# Altium schematic symbol library SCH_Lib.SchLib: 59 symbols (part 1 of 2)
Pins are listed as number, name and electrical type; pins without a type are passive.

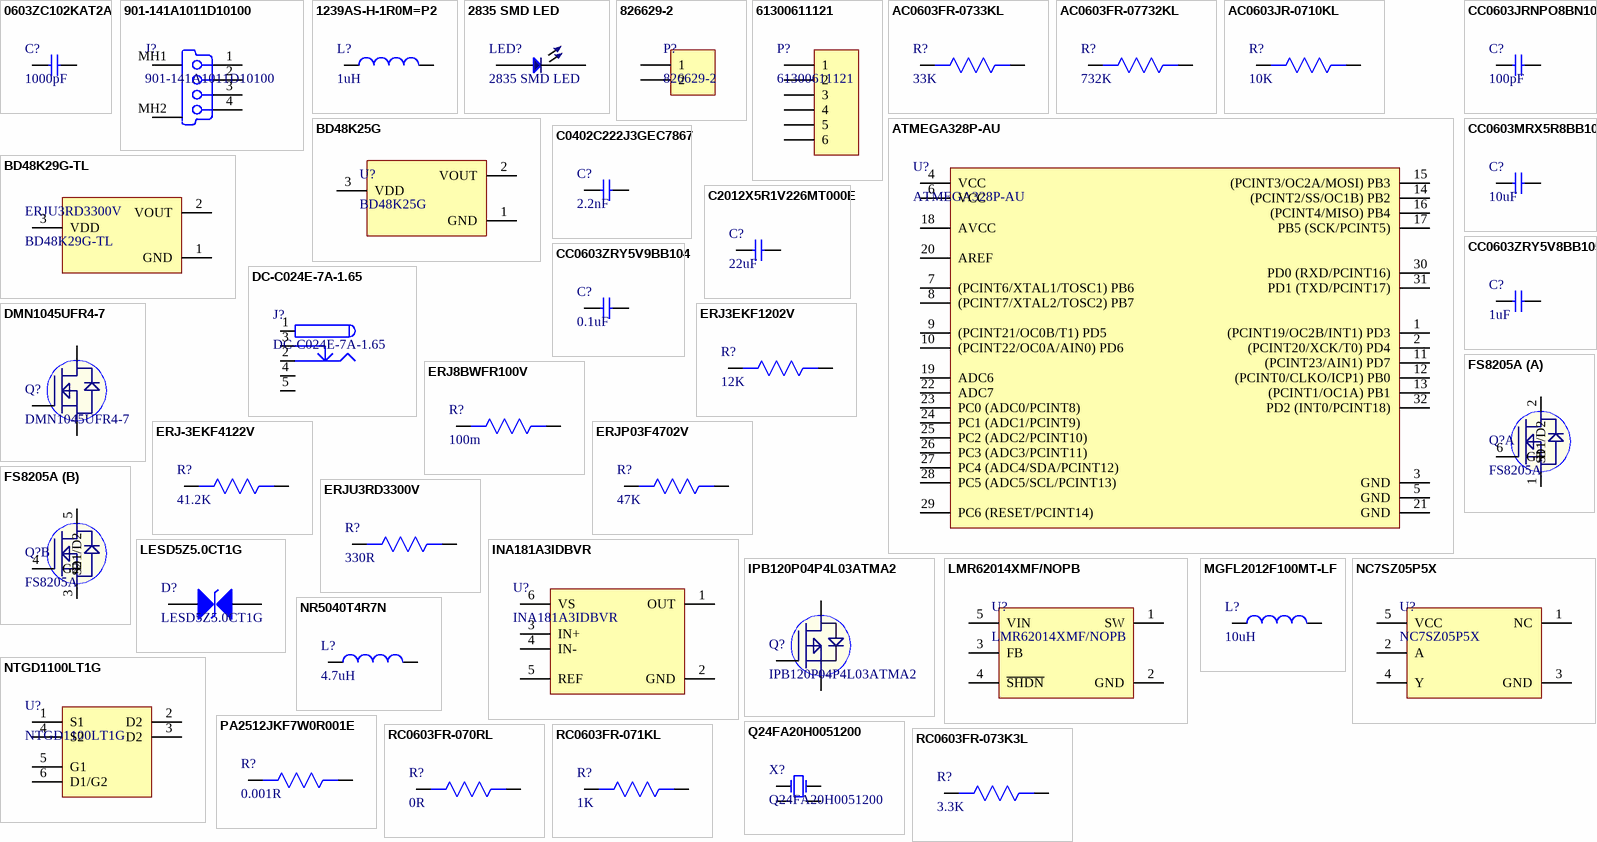
[diagram p0: symbols 0603ZC102KAT2A to RC0603FR-073K3L]

## 0603ZC102KAT2A
designator C?, comment 1000pF
CAP CER 1000PF 10V X7R 0603; Manufacturer: Kyocera AVX; Manufacturer Part Number: 0603ZC102KAT2A; Capacitance: 1nF; Tolerance: 10%; Dissipation Factor: 5%; Supplier 1: Digi-Key; RoHS: Yes; Category: Ceramic Capacitors; Stock 1: 43409; Pricing 1: 1=0.10000, 10=0.05400, 50=0.02960, 100=0.02420, 500=0.01730, 1000=0.01360 (USD); Mount: Surface Mount; Case/Package: 0603; Number of Pins: 2; Case Code (Metric): 1608; Case Code (Imperial): 0603; Min Operating Temperature: -55°C; Max Operating Temperature: 125°C; Dielectric: X7R; Packaging: Tape and Reel; Voltage Rating: 10V; Package Quantity: 4000; Voltage Rating (DC): 10V; Termination: SMD/SMT; Series: -; Construction: Flat; Length: 1.6mm; Width: 0.032inch; Depth: 0.81mm; Thickness: 0.035inch; Radiation Hardening: No; REACH SVHC: Unknown; Lead Free: Lead Free; RoHS Compliant: Yes; ComponentLink1URL: https://datasheet.ciiva.com/204/cx7r-204553.pdf?src-supplier=Digi-Key; ComponentLink1Description: https://datasheet.ciiva.com/204/cx7r-204553.pdf?src-supplier=Digi-Key; ComponentLink2URL: https://datasheet.ciiva.com/5411/cx7r-218113-5411035.pdf?src-supplier=Mouser; ComponentLink2Description: https://datasheet.ciiva.com/5411/cx7r-218113-5411035.pdf?src-supplier=Mouser; Supplier Part Number 1: 478-0603ZC102KAT2ACT-ND
footprint Cap0603
pins: 1, 2

## 901-141A1011D10100
designator J?
USB - Type A 4 USB 2.0 Female THT; Manufacturer: Jing Extension of the Electronic Co.; Current Rating: 1.5A; Number of Ports: 1; Number of Contacts: 4; Mounting Type: ThroughHole，RightAngle; Connector Type: USB - Type A; Standard: USB 2.0; Gender: Female
footprint 901-141A1011D10100 (USB - Type A 4 USB 2.0 Female)
pins: 1 V BUS (5V) "USB Vcc [Red]", 2 D- "USB Data - [White]", 3 D+ "USB Data + [Green]", 4 GND "Not Connected (or joined to pin 5 via resistor)", MH1 Tab "Shell", MH2 Tab "Shell"

## 1239AS-H-1R0M=P2
designator L?, comment 1uH
FIXED IND 1UH 3A 59 MOHM SMD; Manufacturer: Murata; Manufacturer Part Number: 1239AS-H-1R0M=P2; Core Material: Ferrite; Shielding: Shielded; DC Resistance (DCR): 59mR; Test Frequency: 1MHz; Tolerance: 20%; Supplier 1: Digi-Key; RoHS: Yes; Category: Fixed Inductors; Stock 1: 43093; Pricing 1: 1=0.39000, 10=0.34400, 25=0.30120, 50=0.25840, 100=0.23680, 250=0.21524, 500=0.20234, 1000=0.15498 (USD); Mount: Surface Mount; Case/Package: 1008; Case Code (Metric): 2520; Case Code (Imperial): 1008; Min Operating Temperature: -40°C; Max Operating Temperature: 85°C; Packaging: Tape and Reel; Resistor Type: Wirewound; Inductance: 1uH; Current Rating: 3A; Length: 0.098inch; Width: 0.079inch; Height - Seated (Max): 0.047inch; RoHS Compliant: Yes; ComponentLink1URL: http://www.farnell.com/datasheets/2339712.pdf?src-supplier=Farnell; ComponentLink1Description: http://www.farnell.com/datasheets/2339712.pdf?src-supplier=Farnell; ComponentLink2URL: https://www.mouser.com/ds/2/281/product-1023205.pdf?src-supplier=Mouser; ComponentLink2Description: https://www.mouser.com/ds/2/281/product-1023205.pdf?src-supplier=Mouser; ComponentLink3URL: https://www.murata.com/~/media/webrenewal/products/inductor/chip/tokoproducts/wirewoundmetalalloychiptype/m_dfe252012c.ashx?src-supplier=Digi-Key; ComponentLink3Description: https://www.murata.com/~/media/webrenewal/products/inductor/chip/tokoproducts/wirewoundmetalalloychiptype/m_dfe252012c.ashx?src-supplier=Digi-Key; Supplier Part Number 1: 490-10564-1-ND
footprint 1239AS-H-1R0M=P2 (3A 1uH ±20% 59mO 1008 Inductors (SMD) ROHS)
pins: 1, 2

## 2835 SMD LED
designator LED?
SMD LED 2835 Chips 1W 3V SMD; Manufacturer: ENLINCA; Max. Forward voltage: 3V; Package: 2835
footprint 2835 LED (1W LED SMD)
pins: 1, 2

## 826629-2
designator P?
CONN HEADER VERT 2POS 2.54MM; Manufacturer: TE Connectivity; Manufacturer Part Number: 8266292; Number of Contacts: 2; Connector Type: Plug,Header,Pin; Current Rating: 3A; Board Standoff: No (Without); High Speed Serial Data Connector: No; PCB Mount Retention: Without; Gender: Male; PCB Mounting Orientation: Vertical; Contact Post Length: 0.1259inch; Plating Thickness: 0.8um; Supplier 1: RSComponents; RoHS: Yes; Category: Board to Board Connectors; Mount: Straddle Mount; Contact Plating: Gold,Tin; Contact Material: Bronze; Color: Green; Housing Color: Green; Housing Material: PBT; Contact Shape: Square; Min Operating Temperature: -65°C; Max Operating Temperature: 105°C; Number of Rows: 1; Termination: Through Hole; Number of Positions: 2; Packaging: Carton; Package Quantity: 3000; Series: AMPMODU MOD II; Contact Type: Male Pin; Contact Gender: Male; Orientation: Straight; Contact Protection: No (Without); Gasket: No (Without); High Temperature Housing: No; Keyed: No; Mating Alignment: No (Without); Mating Connector Lock: No (Without); Selectively Loaded: No (Without); Stabilizers: No (Without); Strain Relief: No (Without); Length: 5.08mm; Pitch: 2.54mm; Contact Mating Length: 6.7mm; Row Spacing: 2.54mm; Depth: 2.5mm; Radiation Hardening: No; Flammability Rating: UL94 V-0; REACH SVHC: No SVHC; ELV: Compliant; Lead Free: Lead Free; ComponentLink1URL: https://datasheet.ciiva.com/11746/0900766b80d7c358-11746248.pdf?src-supplier=RSComponents; ComponentLink1Description: https://datasheet.ciiva.com/11746/0900766b80d7c358-11746248.pdf?src-supplier=RSComponents; ComponentLink2URL: https://datasheet.ciiva.com/30224/8266292-30224019.pdf?src-supplier=Onlinecomponents.com; ComponentLink2Description: https://datasheet.ciiva.com/30224/8266292-30224019.pdf?src-supplier=Onlinecomponents.com; ComponentLink3URL: https://datasheet.ciiva.com/29369/001094754-da-01-en-stiftleiste-1-reihig-0-0826629-2-29369600.pdf?src-supplier=Conrad; ComponentLink3Description: https://datasheet.ciiva.com/29369/001094754-da-01-en-stiftleiste-1-reihig-0-0826629-2-29369600.pdf?src-supplier=Conrad; ComponentLink4URL: https://datasheet.ciiva.com/6857/eng-cd-826629-aa-basefilename-6857135.pdf?src-supplier=Digi-Key; ComponentLink4Description: https://datasheet.ciiva.com/6857/eng-cd-826629-aa-basefilename-6857135.pdf?src-supplier=Digi-Key; ComponentLink5URL: https://datasheet.ciiva.com/14120/eh826629-draw-14120837.pdf?src-supplier=Distrelec; ComponentLink5Description: https://datasheet.ciiva.com/14120/eh826629-draw-14120837.pdf?src-supplier=Distrelec; Supplier Part Number 1: 1361864
footprint HDR1X2 (CONN HEADER VERT 2POS 2.54MM)
pins: 1, 2

## 61300611121
designator P?
CONN HEADER VERT 6POS 2.54MM; Manufacturer: Wurth Electronics; Current Rating: 3A; Voltage Rating: 250V; Number of Positions: 6; Gender: Male; Connector Type: Male Pin; Pitch: 0.1inch; Supplier 1: Digi-Key; Manufacturer Part Number: 61300611121; Stock 1: 14573; Pricing 1: 1=0.33, 10=0.279, 25=0.232, 50=0.194, 100=0.176, 1000=0.16 (USD); Mount: Through Hole; Contact Plating: Gold; Contact Material: Copper Alloy,Copper; Housing Material: PBT; Color: Black; Min Operating Temperature: -40°C; Max Operating Temperature: 125°C; Number of Rows: 1; Contact Gender: Male; Packaging: Bulk; Termination: Through Hole; Number of Contacts: 6; Contact Mating Length: 0.236inch; REACH SVHC: Unknown; Lead Free: Lead Free; ComponentLink1URL: http://www.farnell.com/cad/1737268.pdf?src-supplier=Element14; ComponentLink1Description: http://www.farnell.com/cad/1737268.pdf?src-supplier=Element14; ComponentLink2URL: https://katalog.we-online.de/em/datasheet/6130xx11121.pdf?src-supplier=Digi-Key; ComponentLink2Description: https://katalog.we-online.de/em/datasheet/6130xx11121.pdf?src-supplier=Digi-Key; ComponentLink3URL: http://www.mouser.com/ds/2/445/6130xx11121-538006.pdf?src-supplier=Mouser; ComponentLink3Description: http://www.mouser.com/ds/2/445/6130xx11121-538006.pdf?src-supplier=Mouser; Supplier Part Number 1: 732-5319-ND
footprint HDR1X6 (Connector; Header; 6 Position)
pins: 1, 2, 3, 4, 5, 6

## AC0603FR-0733KL
designator R?, comment 33K
RES SMD 33K OHM 1% 1/10W 0603; Manufacturer: Yageo; Manufacturer Part Number: AC0603FR-0733KL; Resistance: 33kR; Power Rating: 100mW; Voltage Rating: 50V; Temperature Coefficient: 100ppm/°C; Supplier 1: Digi-Key; RoHS: Yes; Category: Chip SMD Resistors; Stock 1: 9255; Pricing 1: 1=0.10000, 10=0.02900, 100=0.01170, 1000=0.00527, 2500=0.00458 (USD); Case/Package: 0603; Case Code (Imperial): 0603; Case Code (Metric): 1608; Min Operating Temperature: -55°C; Max Operating Temperature: 155°C; Tolerance: 1%; Packaging: Tape and Reel; Resistor Type: Thick Film; Number of Terminations: 2; Termination: SMD/SMT; Max Power Dissipation: 100mW; Features: Moisture Resistant,Automotive AEC-Q200; Series: AC; Construction: Rectangular; Length: 1.6mm; Width: 0.031inch; Height: 0.022inch; Depth: 0.8mm; Military Standard: Not; Lead Free: Lead Free; RoHS Compliant: Yes; ComponentLink1URL: http://components.arrow.com/part/dataview/0323_03349868?src-supplier=Arrow+Europe; ComponentLink1Description: http://components.arrow.com/part/dataview/0323_03349868?src-supplier=Arrow+Europe; ComponentLink2URL: http://www.yageo.com/NewPortal/yageodocoutput?fileName=/pdf/R-Chip/PYu-AC_51_RoHS_L_6.pdf&src-supplier=Arrow+Electronics; ComponentLink2Description: http://www.yageo.com/NewPortal/yageodocoutput?fileName=/pdf/R-Chip/PYu-AC_51_RoHS_L_6.pdf&src-supplier=Arrow+Electronics; ComponentLink3URL: http://www.yageo.com/NewPortal/yageodocoutput?fileName=/pdf/R-Chip/PYu-AC_51_RoHS_L_6.pdf&src-supplier=Digi-Key; ComponentLink3Description: http://www.yageo.com/NewPortal/yageodocoutput?fileName=/pdf/R-Chip/PYu-AC_51_RoHS_L_6.pdf&src-supplier=Digi-Key; ComponentLink4URL: http://www.yageo.com/documents/recent/PYu-AC_51_RoHS_L_2.pdf?src-supplier=Future+Electronics; ComponentLink4Description: http://www.yageo.com/documents/recent/PYu-AC_51_RoHS_L_2.pdf?src-supplier=Future+Electronics; ComponentLink5URL: http://www.yageo.com/NewPortal/yageodocoutput?fileName=/pdf/R-Chip/PYu-AC_51_RoHS_L_6.pdf&src-supplier=Mouser; ComponentLink5Description: http://www.yageo.com/NewPortal/yageodocoutput?fileName=/pdf/R-Chip/PYu-AC_51_RoHS_L_6.pdf&src-supplier=Mouser; ComponentLink6URL: http://www.yageo.com/NewPortal/yageodocoutput?fileName=/pdf/R-Chip/PYu-AC_51_RoHS_L_6.pdf&src-supplier=Rutronik; ComponentLink6Description: http://www.yageo.com/NewPortal/yageodocoutput?fileName=/pdf/R-Chip/PYu-AC_51_RoHS_L_6.pdf&src-supplier=Rutronik; ComponentLink7URL: http://www.yageo.com/NewPortal/yageodocoutput?fileName=/pdf/R-Chip/PYu-AC_51_RoHS_L_6.pdf&src-supplier=Schukat; ComponentLink7Description: http://www.yageo.com/NewPortal/yageodocoutput?fileName=/pdf/R-Chip/PYu-AC_51_RoHS_L_6.pdf&src-supplier=Schukat; ComponentLink8URL: http://www.yageo.com/NewPortal/yageodocoutput?fileName=/pdf/R-Chip/PYu-AC_51_RoHS_L_6.pdf&src-supplier=TTI; ComponentLink8Description: http://www.yageo.com/NewPortal/yageodocoutput?fileName=/pdf/R-Chip/PYu-AC_51_RoHS_L_6.pdf&src-supplier=TTI; Supplier Part Number 1: YAG3598CT-ND
footprint Res0603
pins: 1, 2

## AC0603FR-07732KL
designator R?, comment 732K
RES SMD 732kOhm 1% 0603; Manufacturer: Yageo; Manufacturer Part Number: AC0603FR-07732KL; Power Rating: 100mW; Resistance: 732kR; Voltage Rating: 50V; Temperature Coefficient: 100ppm/°C; Supplier 1: Mouser; RoHS: Yes; Category: Chip SMD Resistors; Stock 1: 40000; Pricing 1: 1=0.10000, 10=0.02200, 50=0.02200, 100=0.00800, 1000=0.00600, 10000=0.00400 (USD); Case/Package: 0603; Case Code (Imperial): 0603; Case Code (Metric): 1608; Min Operating Temperature: -55°C; Max Operating Temperature: 155°C; Packaging: Tape and Reel; Tolerance: 1%; Resistor Type: Thick Film; Number of Terminations: 2; Termination: SMD/SMT; Max Power Dissipation: 100mW; Features: Moisture Resistant,Automotive AEC-Q200; Series: AC; Length: 0.063inch; Width: 0.031inch; Height: 0.022inch; RoHS Compliant: Yes; ComponentLink1URL: http://www.mouser.com/ds/2/447/yageodocoutput-1111992.pdf?src-supplier=Mouser; ComponentLink1Description: http://www.mouser.com/ds/2/447/yageodocoutput-1111992.pdf?src-supplier=Mouser; ComponentLink2URL: http://www.yageo.com/NewPortal/yageodocoutput?fileName=/pdf/R-Chip/PYu-AC_51_RoHS_L_6.pdf&src-supplier=Digi-Key; ComponentLink2Description: http://www.yageo.com/NewPortal/yageodocoutput?fileName=/pdf/R-Chip/PYu-AC_51_RoHS_L_6.pdf&src-supplier=Digi-Key; Supplier Part Number 1: 603-AC0603FR-07732KL
footprint Res0603
pins: 1, 2

## AC0603JR-0710KL
designator R?, comment 10K
RES SMD 10K OHM 5% 1/10W 0603; Manufacturer: Yageo; Manufacturer Part Number: AC0603JR-0710KL; Voltage Rating: 50V; Resistance: 10kR; Power Rating: 100mW; Temperature Coefficient: 100ppm/°C; Supplier 1: Future Electronics; RoHS: Yes; Category: Chip SMD Resistors; Stock 1: 1533000; Pricing 1: 5000=0.00540 (USD); Case/Package: 0603; Case Code (Imperial): 0603; Case Code (Metric): 1608; Size Code: 0603; Min Operating Temperature: -55°C; Max Operating Temperature: 155°C; Packaging: Tape and Reel; Tolerance: 5%; Package Quantity: 1; Resistor Type: Thick Film; Termination: SMD/SMT; Number of Terminations: 2; Max Power Dissipation: 100mW; Features: Moisture Resistant,Automotive AEC-Q200,Anti-Sulfur; Series: AC; Construction: Rectangular; Length: 0.063inch; Width: 0.031inch; Height: 0.022inch; Depth: 0.8mm; Military Standard: Not; Lead Free: Lead Free; RoHS Compliant: Yes; ComponentLink1URL: https://datasheet.ciiva.com/5562/pyu-ac-51-rohs-l-2-5562553.pdf?src-supplier=Mouser; ComponentLink1Description: https://datasheet.ciiva.com/5562/pyu-ac-51-rohs-l-2-5562553.pdf?src-supplier=Mouser; Supplier Part Number 1: 1029044
footprint Res0603
pins: 1, 2

## ATMEGA328P-AU
designator U?
IC MCU 8BIT 32KB FLASH 32TQFP; Manufacturer: Microchip / Atmel; Frequency: 20MHz; Interface: I2C,SPI,USART; Number of I/Os: 23; Oscillator Type: Internal; Peripherals: Brown-out Detect/Reset,POR,PWM,WDT; Core Architecture: AVR; RAM Size: 2KB; Max Supply Voltage: 5.5V; Min Supply Voltage: 1.8V; Number of Timers/Counters: 3; Data Bus Width: 8b; Watchdog Timer: Yes; Number of ADC Channels: 8; Number of PWM Channels: 6; Number of SPI Channels: 1; Supplier 1: Newark; Manufacturer Part Number: ATMEGA328P-AU; RoHS: Yes; Category: Microcontrollers; Mount: Surface Mount; Case/Package: A; Number of Pins: 32; Weight: 0.002469oz; Min Operating Temperature: -40°C; Max Operating Temperature: 85°C; Packaging: Tray; Memory Type: FLASH; Memory Size: 32KB; Package Quantity: 250; Number of Programmable I/O: 23; Max Frequency: 20MHz; Series: ATmega328P; Number of I2C Channels: 1; Length: 7mm; Width: 7mm; Height: 1mm; Radiation Hardening: No; RoHS Compliant: Yes; REACH SVHC: No SVHC; Lead Free: Lead Free; ComponentLink1URL: https://datasheet.ciiva.com/1166/doc8161-1166860.pdf?src-supplier=Newark; ComponentLink1Description: https://datasheet.ciiva.com/1166/doc8161-1166860.pdf?src-supplier=Newark; ComponentLink2URL: https://datasheet.ciiva.com/29119/155196-da-01-en-microcontr-atmega328p-au-8bit-tqfp-32-29119594.pdf?src-supplier=Conrad; ComponentLink2Description: https://datasheet.ciiva.com/29119/155196-da-01-en-microcontr-atmega328p-au-8bit-tqfp-32-29119594.pdf?src-supplier=Conrad; ComponentLink3URL: https://datasheet.ciiva.com/1157/1693866-1157693.pdf?src-supplier=Element14; ComponentLink3Description: https://datasheet.ciiva.com/1157/1693866-1157693.pdf?src-supplier=Element14; ComponentLink4URL: https://datasheet.ciiva.com/15213/getdatasheetpartid-365828-15213131.pdf?src-supplier=Verical; ComponentLink4Description: https://datasheet.ciiva.com/15213/getdatasheetpartid-365828-15213131.pdf?src-supplier=Verical; Supplier Part Number 1: 25AC6140
footprint 32 TQFP (7X7) (IC MCU 8BIT 32KB FLASH 32TQFP)
pins: 1 (PCINT19/OC2B/INT1) PD3, 2 (PCINT20/XCK/T0) PD4, 3 GND, 4 VCC, 5 GND, 6 VCC, 7 (PCINT6/XTAL1/TOSC1) PB6, 8 (PCINT7/XTAL2/TOSC2) PB7, 9 (PCINT21/OC0B/T1) PD5, 10 (PCINT22/OC0A/AIN0) PD6, 11 (PCINT23/AIN1) PD7, 12 (PCINT0/CLKO/ICP1) PB0, 13 (PCINT1/OC1A) PB1, 14 (PCINT2/SS/OC1B) PB2, 15 (PCINT3/OC2A/MOSI) PB3, 16 (PCINT4/MISO) PB4, 17 PB5 (SCK/PCINT5), 18 AVCC, 19 ADC6, 20 AREF, 21 GND, 22 ADC7, 23 PC0 (ADC0/PCINT8), 24 PC1 (ADC1/PCINT9), 25 PC2 (ADC2/PCINT10), 26 PC3 (ADC3/PCINT11), 27 PC4 (ADC4/SDA/PCINT12), 28 PC5 (ADC5/SCL/PCINT13), 29 PC6 (RESET/PCINT14), 30 PD0 (RXD/PCINT16), 31 PD1 (TXD/PCINT17), 32 PD2 (INT0/PCINT18)

## BD48K25G
designator U?
IC SUPERVISOR 1 CHANNEL 3SSOP; Manufacturer: Rohm; Manufacturer Part Number: BD48K25G-TL; Max Supply Voltage: 6V; Min Supply Voltage: 2.3V; Number of Voltages Monitored: 1; Reset: Active Low; Threshold Voltage: 2.5V; Accuracy: 1%; Operating Supply Current: 900nA; ComponentLink1URL: https://datasheet.ciiva.com/3231/lmr62014-3231410.pdf?src-supplier=Avnet; ComponentLink1Description: https://datasheet.ciiva.com/3231/lmr62014-3231410.pdf?src-supplier=Avnet; ComponentLink2URL: https://datasheet.ciiva.com/23854/1777788-23854326.pdf?src-supplier=Newark; ComponentLink2Description: https://datasheet.ciiva.com/23854/1777788-23854326.pdf?src-supplier=Newark; ComponentLink3URL: https://datasheet.ciiva.com/4879/snvs735a-74121-4879731.pdf?src-supplier=Mouser; ComponentLink3Description: https://datasheet.ciiva.com/4879/snvs735a-74121-4879731.pdf?src-supplier=Mouser; ComponentLink4URL: https://datasheet.ciiva.com/22669/1716576-22669414.pdf?src-supplier=Element14; ComponentLink4Description: https://datasheet.ciiva.com/22669/1716576-22669414.pdf?src-supplier=Element14; ComponentLink5URL: https://datasheet.ciiva.com/6603/lmr62014-6603804.pdf?src-supplier=Digi-Key; ComponentLink5Description: https://datasheet.ciiva.com/6603/lmr62014-6603804.pdf?src-supplier=Digi-Key; ComponentLink6URL: https://datasheet.ciiva.com/6603/lmr62014-6603807.pdf?src-supplier=Digi-Key; ComponentLink6Description: https://datasheet.ciiva.com/6603/lmr62014-6603807.pdf?src-supplier=Digi-Key; Supplier 1: Digi-Key; Stock 1: 1860; Pricing 1: 1=0.48, 10=0.39, 25=0.3568, 100=0.2656, 250=0.2407, 500=0.1992, 1000=0.1494 (USD); Mount: Surface Mount; Case/Package: TO-236-3; Number of Pins: 3; Min Operating Temperature: -40°C; Max Operating Temperature: 105°C; Packaging: Tape and Reel; Package Quantity: 3000; Number of Monitored Inputs: 1; Type: Simple Reset/Power-On Reset; Series: BD48xxx; Lead Free: Lead Free; ComponentLink7URL: https://www.verical.com/server-webapp/html/getDatasheet?partID=705722&src-supplier=Verical; ComponentLink7Description: https://www.verical.com/server-webapp/html/getDatasheet?partID=705722&src-supplier=Verical; ComponentLink8URL: http://rohmfs.rohm.com/en/techdata_basic/ic/package/ssop3_1-e.pdf?src-supplier=Digi-Key; ComponentLink8Description: http://rohmfs.rohm.com/en/techdata_basic/ic/package/ssop3_1-e.pdf?src-supplier=Digi-Key; ComponentLink9URL: http://rohmfs.rohm.com/en/products/databook/datasheet/ic/power/voltage_detector/bd48xxg-e.pdf?src-supplier=Digi-Key; ComponentLink9Description: http://rohmfs.rohm.com/en/products/databook/datasheet/ic/power/voltage_detector/bd48xxg-e.pdf?src-supplier=Digi-Key; Supplier Part Number 1: BD48K25G-TLDKR-ND
footprint 3-SSOP
pins: 1 GND, 2 VOUT, 3 VDD

## BD48K29G-TL
designator ERJU3RD3300V
IC DETECTOR VOLT 2.9V OD SSOP3; Manufacturer: Rohm; Max Supply Voltage: 6V; Min Supply Voltage: 2.3V; Number of Voltages Monitored: 1; Reset: Active Low; Accuracy: 1%; Operating Supply Current: 900nA; Max Reset Threshold Voltage: 2.929V; Min Reset Threshold Voltage: 2.871V; Supplier 1: Mouser; Manufacturer Part Number: BD48K29G-TL; RoHS: Yes; Category: Voltage Supervisors; Stock 1: 2854; Pricing 1: 1=0.48000, 10=0.39100, 50=0.39100, 100=0.24100, 500=0.20000, 1000=0.15000, 3000=0.13600, 10000=0.13600 (USD); Mount: Surface Mount; Case/Package: SSOP; Number of Pins: 3; Min Operating Temperature: -40°C; Max Operating Temperature: 105°C; Packaging: Tape and Reel; Package Quantity: 1; Threshold Voltage: 2.9V; Number of Monitored Inputs: 1; Type: Simple Reset/Power-On Reset,Voltage Detector; Series: BD48xxx; Radiation Hardening: No; Lead Free: Lead Free; RoHS Compliant: Yes; ComponentLink1URL: https://datasheet.ciiva.com/15105/getdatasheetpartid-705726-15105774.pdf?src-supplier=Verical; ComponentLink1Description: https://datasheet.ciiva.com/15105/getdatasheetpartid-705726-15105774.pdf?src-supplier=Verical; ComponentLink2URL: https://datasheet.ciiva.com/6598/bd48xxg-e-6598662.pdf?src-supplier=Digi-Key; ComponentLink2Description: https://datasheet.ciiva.com/6598/bd48xxg-e-6598662.pdf?src-supplier=Digi-Key; Supplier Part Number 1: 755-BD48K29G-TL
footprint 3-SSOP
pins: 1 GND, 2 VOUT, 3 VDD

## C0402C222J3GEC7867
designator C?, comment 2.2nF
CAP CER 0402 2.2NF 25V C0G 5%; Manufacturer: KEMET; Manufacturer Part Number: C0402C222J3GEC7867; ComponentLink1URL: http://www.yageo.com/documents/recent/UPY-GPHC_Y5V_6.3V-to-50V_8.pdf?src-supplier=Digi-Key; ComponentLink1Description: http://www.yageo.com/documents/recent/UPY-GPHC_Y5V_6.3V-to-50V_8.pdf?src-supplier=Digi-Key; ComponentLink2URL: http://www.yageo.com/documents/recent/UPY-GPHC_Y5V_6.3V-to-50V_5.pdf?src-supplier=Avnet+Europe; ComponentLink2Description: http://www.yageo.com/documents/recent/UPY-GPHC_Y5V_6.3V-to-50V_5.pdf?src-supplier=Avnet+Europe; ComponentLink3URL: https://www.verical.com/server-webapp/html/getDatasheet?partID=403611&src-supplier=Verical; ComponentLink3Description: https://www.verical.com/server-webapp/html/getDatasheet?partID=403611&src-supplier=Verical; ComponentLink4URL: http://www.mouser.com/ds/2/447/Yageo_UPY-GP_NP0_16V-to-50V_9-358835.pdf?src-supplier=Mouser; ComponentLink4Description: http://www.mouser.com/ds/2/447/Yageo_UPY-GP_NP0_16V-to-50V_9-358835.pdf?src-supplier=Mouser; ComponentLink5URL: http://www.farnell.com/datasheets/1132289.pdf?src-supplier=Element14; ComponentLink5Description: http://www.farnell.com/datasheets/1132289.pdf?src-supplier=Element14; ComponentLink6URL: http://www.yageo.com/documents/recent/UPY-GP_NP0_16V-to-50V_8.pdf?src-supplier=Avnet; ComponentLink6Description: http://www.yageo.com/documents/recent/UPY-GP_NP0_16V-to-50V_8.pdf?src-supplier=Avnet; ComponentLink7URL: http://www.yageo.com/documents/recent/UPY-GP_NP0_16V-to-50V_8.pdf?src-supplier=Avnet+Europe; ComponentLink7Description: http://www.yageo.com/documents/recent/UPY-GP_NP0_16V-to-50V_8.pdf?src-supplier=Avnet+Europe; Supplier 1: Digi-Key; Stock 1: 5024; Pricing 1: 1=0.17, 10=0.123, 50=0.07, 100=0.058, 500=0.0407, 1000=0.0337, 2500=0.0314, 5000=0.0287 (USD); ComponentLink8URL: https://api.kemet.com/component-edge/download/datasheet/C0402C222J3GEC7867.pdf?src-supplier=Digi-Key; ComponentLink8Description: https://api.kemet.com/component-edge/download/datasheet/C0402C222J3GEC7867.pdf?src-supplier=Digi-Key; Supplier Part Number 1: 399-C0402C222J3GEC7867CT-ND
footprint Cap 0402
pins: 1, 2

## C2012X5R1V226MT000E
designator C?, comment 22uF
CAP CER 22UF 35V X5R 0805; Manufacturer: TDK Corporation; Manufacturer Part No: C2012X5R1V226M125AC; Package: 0805; ComponentLink1Description: Digikey; ComponentLink1URL: https://www.digikey.com/en/products/detail/tdk-corporation/C2012X5R1V226M125AC/3951664?s=N4IgTCBcDaIMJgAwEYwA0CsAlZA1MYAbALIAqiFAoiALoC%2BQA
footprint Cap0805 (SMD 0805)
pins: 1, 2

## CC0603JRNPO8BN101
designator C?, comment 100pF
CAP CER 100PF 25V C0G/NPO 0603; Manufacturer: Yageo; Manufacturer Part Number: CC0603JRNPO8BN101; Tolerance: 5%; Dielectric: C0G; ComponentLink1URL: http://www.yageo.com/documents/recent/UPY-GPHC_Y5V_6.3V-to-50V_8.pdf?src-supplier=Digi-Key; ComponentLink1Description: http://www.yageo.com/documents/recent/UPY-GPHC_Y5V_6.3V-to-50V_8.pdf?src-supplier=Digi-Key; ComponentLink2URL: http://www.yageo.com/documents/recent/UPY-GPHC_Y5V_6.3V-to-50V_5.pdf?src-supplier=Avnet+Europe; ComponentLink2Description: http://www.yageo.com/documents/recent/UPY-GPHC_Y5V_6.3V-to-50V_5.pdf?src-supplier=Avnet+Europe; ComponentLink3URL: https://www.verical.com/server-webapp/html/getDatasheet?partID=403611&src-supplier=Verical; ComponentLink3Description: https://www.verical.com/server-webapp/html/getDatasheet?partID=403611&src-supplier=Verical; ComponentLink4URL: http://www.mouser.com/ds/2/447/Yageo_UPY-GP_NP0_16V-to-50V_9-358835.pdf?src-supplier=Mouser; ComponentLink4Description: http://www.mouser.com/ds/2/447/Yageo_UPY-GP_NP0_16V-to-50V_9-358835.pdf?src-supplier=Mouser; ComponentLink5URL: http://www.farnell.com/datasheets/1132289.pdf?src-supplier=Element14; ComponentLink5Description: http://www.farnell.com/datasheets/1132289.pdf?src-supplier=Element14; Supplier 1: Digi-Key; Stock 1: 19776; Pricing 1: 1=0.1, 10=0.058, 50=0.0318, 100=0.026, 500=0.0186, 1000=0.0146 (USD); Mount: Surface Mount; Case/Package: 0603; Min Operating Temperature: -55°C; Max Operating Temperature: 125°C; Capacitance: 100pF; Voltage Rating (DC): 25V; Packaging: Tape and Reel; Voltage Rating: 25V; Resistor Type: Ceramic; Series: CC; Construction: Flat; Length: 0.063inch; Width: 0.031inch; Height: 0.8mm; Thickness: 0.035inch; Depth: 0.8mm; Radiation Hardening: No; RoHS Compliant: Yes; ComponentLink6URL: http://www.yageo.com/documents/recent/UPY-GP_NP0_16V-to-50V_8.pdf?src-supplier=Avnet; ComponentLink6Description: http://www.yageo.com/documents/recent/UPY-GP_NP0_16V-to-50V_8.pdf?src-supplier=Avnet; ComponentLink7URL: http://www.yageo.com/documents/recent/UPY-GP_NP0_16V-to-50V_8.pdf?src-supplier=Avnet+Europe; ComponentLink7Description: http://www.yageo.com/documents/recent/UPY-GP_NP0_16V-to-50V_8.pdf?src-supplier=Avnet+Europe; Supplier Part Number 1: 311-3949-1-ND
footprint Cap0603
pins: 1, 2

## CC0603MRX5R8BB106
designator C?, comment 10uF
CAP CER 10UF 25V X5R 0603; Manufacturer: Yageo; Manufacturer Part Number: CC0603MRX5R8BB106; Tolerance: 20%; ComponentLink1URL: http://www.yageo.com/documents/recent/UPY-GPHC_Y5V_6.3V-to-50V_8.pdf?src-supplier=Digi-Key; ComponentLink1Description: http://www.yageo.com/documents/recent/UPY-GPHC_Y5V_6.3V-to-50V_8.pdf?src-supplier=Digi-Key; ComponentLink2URL: http://www.yageo.com/documents/recent/UPY-GPHC_Y5V_6.3V-to-50V_5.pdf?src-supplier=Avnet+Europe; ComponentLink2Description: http://www.yageo.com/documents/recent/UPY-GPHC_Y5V_6.3V-to-50V_5.pdf?src-supplier=Avnet+Europe; ComponentLink3URL: https://www.verical.com/server-webapp/html/getDatasheet?partID=403611&src-supplier=Verical; ComponentLink3Description: https://www.verical.com/server-webapp/html/getDatasheet?partID=403611&src-supplier=Verical; ComponentLink4URL: http://www.mouser.com/ds/2/447/Yageo_UPY-GP_NP0_16V-to-50V_9-358835.pdf?src-supplier=Mouser; ComponentLink4Description: http://www.mouser.com/ds/2/447/Yageo_UPY-GP_NP0_16V-to-50V_9-358835.pdf?src-supplier=Mouser; ComponentLink5URL: http://www.farnell.com/datasheets/1132289.pdf?src-supplier=Element14; ComponentLink5Description: http://www.farnell.com/datasheets/1132289.pdf?src-supplier=Element14; Supplier 1: Digi-Key; Stock 1: 0; Pricing 1: 1=0.77, 10=0.568, 50=0.4542, 100=0.3893, 500=0.3082, 1000=0.2595 (USD); Mount: Surface Mount; Case/Package: 0603; Case Code (Imperial): 0603; Case Code (Metric): 1608; Min Operating Temperature: -55°C; Max Operating Temperature: 85°C; Packaging: Cut Tape; Capacitance: 10uF; Voltage Rating: 25V; RoHS Compliant: Yes; ComponentLink6URL: https://www.yageo.com/upload/media/product/productsearch/datasheet/mlcc/UPY-GPHC_X5R_4V-to-50V_26.pdf?src-supplier=Digi-Key; ComponentLink6Description: https://www.yageo.com/upload/media/product/productsearch/datasheet/mlcc/UPY-GPHC_X5R_4V-to-50V_26.pdf?src-supplier=Digi-Key; Supplier Part Number 1: 311-3494-6-ND
footprint Cap0603
pins: 1, 2

## CC0603ZRY5V8BB105
designator C?, comment 1uF
CAP CER 1UF 25V Y5V 0603; Manufacturer: Yageo; Manufacturer Part Number: CC0603ZRY5V8BB105; Tolerance: 80%; ComponentLink1URL: http://www.yageo.com/documents/recent/UPY-GPHC_Y5V_6.3V-to-50V_8.pdf?src-supplier=Digi-Key; ComponentLink1Description: http://www.yageo.com/documents/recent/UPY-GPHC_Y5V_6.3V-to-50V_8.pdf?src-supplier=Digi-Key; ComponentLink2URL: http://www.yageo.com/documents/recent/UPY-GPHC_Y5V_6.3V-to-50V_5.pdf?src-supplier=Avnet+Europe; ComponentLink2Description: http://www.yageo.com/documents/recent/UPY-GPHC_Y5V_6.3V-to-50V_5.pdf?src-supplier=Avnet+Europe; ComponentLink3URL: https://www.verical.com/server-webapp/html/getDatasheet?partID=403611&src-supplier=Verical; ComponentLink3Description: https://www.verical.com/server-webapp/html/getDatasheet?partID=403611&src-supplier=Verical; ComponentLink4URL: http://www.mouser.com/ds/2/447/Yageo_UPY-GP_NP0_16V-to-50V_9-358835.pdf?src-supplier=Mouser; ComponentLink4Description: http://www.mouser.com/ds/2/447/Yageo_UPY-GP_NP0_16V-to-50V_9-358835.pdf?src-supplier=Mouser; ComponentLink5URL: http://www.farnell.com/datasheets/1132289.pdf?src-supplier=Element14; ComponentLink5Description: http://www.farnell.com/datasheets/1132289.pdf?src-supplier=Element14; Supplier 1: Digi-Key; Stock 1: 82432; Pricing 1: 1=0.13, 10=0.096, 50=0.0544, 100=0.045, 500=0.0316, 1000=0.0261 (USD); Mount: Surface Mount; Case/Package: 0603; Case Code (Imperial): 0603; Case Code (Metric): 1608; Min Operating Temperature: -30°C; Max Operating Temperature: 85°C; Voltage Rating (DC): 25V; Packaging: Tape and Reel; Capacitance: 1uF; Voltage Rating: 25V; Dielectric: Y5V; Termination: SMD/SMT; Resistor Type: Ceramic; Series: CC; Length: 0.063inch; Width: 0.031inch; Height: 0.8mm; Thickness: 0.035inch; Lead Free: Lead Free; Halogen Free: Halogen Free; RoHS Compliant: Yes; Supplier Part Number 1: 311-1829-1-ND
footprint Cap0603
pins: 1, 2

## CC0603ZRY5V9BB104
designator C?, comment 0.1uF
CAP CER 0.1UF 50V Y5V 0603; Manufacturer: Yageo; Manufacturer Part Number: CC0603ZRY5V9BB104; Capacitance: 100nF; Tolerance: 80%; Supplier 1: Digi-Key; Stock 1: 15000880; Pricing 1: 1=0.1, 10=0.075, 100=0.0334, 500=0.02386, 1000=0.01874 (USD); Mount: Surface Mount; Case/Package: 0603; Number of Pins: 2; Case Code (Metric): 1608; Case Code (Imperial): 0603; Min Operating Temperature: -30°C; Max Operating Temperature: 85°C; Dielectric: Y5V; Voltage Rating: 50V; Package Quantity: 1; Packaging: Tape and Reel; Voltage Rating (DC): 50V; Termination: SMD/SMT; Composition: Ceramic; Voltage: 50V; Length: 1.6mm; Height: 0.8mm; Width: 0.031inch; Thickness: 0.035inch; Depth: 0.8mm; Radiation Hardening: No; REACH SVHC: No SVHC; Lead Free: Lead Free; Halogen Free: Halogen Free; ComponentLink1URL: http://www.yageo.com/documents/recent/UPY-GPHC_Y5V_6.3V-to-50V_8.pdf?src-supplier=Digi-Key; ComponentLink1Description: http://www.yageo.com/documents/recent/UPY-GPHC_Y5V_6.3V-to-50V_8.pdf?src-supplier=Digi-Key; ComponentLink2URL: http://www.yageo.com/documents/recent/UPY-GPHC_Y5V_6.3V-to-50V_5.pdf?src-supplier=Avnet+Europe; ComponentLink2Description: http://www.yageo.com/documents/recent/UPY-GPHC_Y5V_6.3V-to-50V_5.pdf?src-supplier=Avnet+Europe; ComponentLink3URL: https://www.verical.com/server-webapp/html/getDatasheet?partID=403611&src-supplier=Verical; ComponentLink3Description: https://www.verical.com/server-webapp/html/getDatasheet?partID=403611&src-supplier=Verical; ComponentLink4URL: http://www.mouser.com/ds/2/447/Yageo_UPY-GP_NP0_16V-to-50V_9-358835.pdf?src-supplier=Mouser; ComponentLink4Description: http://www.mouser.com/ds/2/447/Yageo_UPY-GP_NP0_16V-to-50V_9-358835.pdf?src-supplier=Mouser; ComponentLink5URL: http://www.farnell.com/datasheets/1132289.pdf?src-supplier=Element14; ComponentLink5Description: http://www.farnell.com/datasheets/1132289.pdf?src-supplier=Element14; Supplier Part Number 1: 311-1343-1-ND
footprint Cap0603
pins: 1, 2

## DC-C024E-7A-1.65
designator J?
7A Jack DCPowerReceptacle 4.3mm 1.65mm; Manufacturer: XKB Connectivity; Voltage Rating: 24V; Current Rating: 7A; Connector Type: Jack; Product Type: DCPowerReceptacle; Outside Contact Diameter: 4.3mm; Inside Contact Diameter: 1.65mm; ComponentLink1Description: LCSC; ComponentLink1URL: https://lcsc.com/product-detail/AC-DC-Power-Connectors_XKB-Connectivity-DC-C024E-7A-1-65_C397335.html
footprint DC-C024E-7A-1.65 (7A Jack DCPowerReceptacle 4.3mm 1.65mm)
pins: 1 (power), 2 (power), 3 (power), 4 (power), 5 (power)

## DMN1045UFR4-7
designator Q?
Mosfet N-ch 12V 3.2A 3-PIN X2-DFN T/r; Manufacturer: Diodes; Rds On Max: 45mR; Input Capacitance: 375pF; Max Power Dissipation: 500mW; Supplier 1: Digi-Key; Manufacturer Part Number: DMN1045UFR4-7; RoHS: Yes; Category: MOSFETs; Pricing 1: 1=0.50000, 10=0.37400, 100=0.23280, 500=0.15930, 1000=0.12254 (USD); Mount: Surface Mount; Number of Pins: 3; Min Operating Temperature: -55°C; Max Operating Temperature: 150°C; Packaging: Tape and Reel; Drain to Source Voltage (Vdss): 12V; Continuous Drain Current (ID): 3.2A; RoHS Compliant: Yes; ComponentLink1URL: http://www.mouser.com/ds/2/115/DMN1045UFR4-526244.pdf?src-supplier=Mouser; ComponentLink1Description: http://www.mouser.com/ds/2/115/DMN1045UFR4-526244.pdf?src-supplier=Mouser; ComponentLink2URL: https://www.diodes.com/assets/Datasheets/DMN1045UFR4.pdf?src-supplier=Digi-Key; ComponentLink2Description: https://www.diodes.com/assets/Datasheets/DMN1045UFR4.pdf?src-supplier=Digi-Key; Supplier Part Number 1: DMN1045UFR4-7DIDKR-ND
footprint DMN1045UFR4-7
pins: 1 G, 2 S, 3 D

## ERJ3EKF1202V
designator R?, comment 12K
RES SMD 12K OHM 1% 1/10W 0603; Manufacturer: Panasonic; Manufacturer Part Number: ERJ3EKF1202V; Resistance: 12kR; Temperature Coefficient: 100ppm/°C; Power Rating: 100mW; Voltage Rating: 75V; Supplier 1: RSComponents; RoHS: Yes; Category: Chip SMD Resistors; Stock 1: 197000; Pricing 1: 1000=0.00500 (GBP); Mount: Surface Mount; Case/Package: 0603; Number of Pins: 2; Contact Plating: Tin; Case Code (Metric): 1608; Case Code (Imperial): 0603; Weight: 7.1E-05oz; Min Operating Temperature: -55°C; Max Operating Temperature: 155°C; Tolerance: 1%; Resistor Type: Thick Film; Packaging: Tape and Reel; Package Quantity: 5000; Number of Terminations: 2; Termination: SMD/SMT; Max Power Dissipation: 100mW; Voltage Rating (DC): 75V; Features: Automotive AEC-Q200; Series: ERJ; Resistance Tolerance: 1%; Construction: Rectangular; Length: 1.6mm; Width: 0.8mm; Height: 0.45mm; Depth: 0.8mm; Radiation Hardening: No; REACH SVHC: No SVHC; Military Standard: Not; Lead Free: Lead Free; RoHS Compliant: Yes; ComponentLink1URL: https://datasheet.ciiva.com/6138/aoa0000ce2-6138712.pdf?src-supplier=Farnell; ComponentLink1Description: https://datasheet.ciiva.com/6138/aoa0000ce2-6138712.pdf?src-supplier=Farnell; ComponentLink2URL: https://datasheet.ciiva.com/7944/aoa0000ce2-7944617.pdf?src-supplier=Element14; ComponentLink2Description: https://datasheet.ciiva.com/7944/aoa0000ce2-7944617.pdf?src-supplier=Element14; ComponentLink3URL: https://datasheet.ciiva.com/22673/1678782-22673693.pdf?src-supplier=Element14; ComponentLink3Description: https://datasheet.ciiva.com/22673/1678782-22673693.pdf?src-supplier=Element14; ComponentLink4URL: https://datasheet.ciiva.com/22687/1678782-22687413.pdf?src-supplier=Element14; ComponentLink4Description: https://datasheet.ciiva.com/22687/1678782-22687413.pdf?src-supplier=Element14; ComponentLink5URL: https://datasheet.ciiva.com/46420/1678782-46420333.pdf?src-supplier=Element14; ComponentLink5Description: https://datasheet.ciiva.com/46420/1678782-46420333.pdf?src-supplier=Element14; ComponentLink6URL: https://datasheet.ciiva.com/24165/aoa0000ce2-24165037.pdf?src-supplier=Mouser; ComponentLink6Description: https://datasheet.ciiva.com/24165/aoa0000ce2-24165037.pdf?src-supplier=Mouser; ComponentLink7URL: https://datasheet.ciiva.com/16783/70260748-16783400.pdf?src-supplier=Allied+Electronics; ComponentLink7Description: https://datasheet.ciiva.com/16783/70260748-16783400.pdf?src-supplier=Allied+Electronics; ComponentLink8URL: https://datasheet.ciiva.com/30121/aoa0000ce2-30121109.pdf?src-supplier=Onlinecomponents.com; ComponentLink8Description: https://datasheet.ciiva.com/30121/aoa0000ce2-30121109.pdf?src-supplier=Onlinecomponents.com; ComponentLink9URL: https://datasheet.ciiva.com/17211/aoa0000ce2-17211797.pdf?src-supplier=Avnet+Europe; ComponentLink9Description: https://datasheet.ciiva.com/17211/aoa0000ce2-17211797.pdf?src-supplier=Avnet+Europe; ComponentLink10URL: https://datasheet.ciiva.com/16511/aoa0000ce2-16511882.pdf?src-supplier=Avnet+Asia; ComponentLink10Description: https://datasheet.ciiva.com/16511/aoa0000ce2-16511882.pdf?src-supplier=Avnet+Asia; Supplier Part Number 1: 1763579
footprint Res0603
pins: 1, 2

## ERJ8BWFR100V
designator R?, comment 100m
RES SMD 1206 0.1 Ohm 1% 1W ±100ppm/°C; Manufacturer: Panasonic; Manufacturer Part Number: ERJ-8BWFR100V; Resistance: 100mR; Supplier 1: Digi-Key; RoHS: Yes; Category: Chip SMD Resistors; Stock 1: 71395; Pricing 1: 1=0.86000, 10=0.63400, 100=0.36940, 1000=0.20719, 2500=0.20002 (USD); Mount: Surface Mount; Case/Package: 1206; Number of Pins: 2; Contact Plating: Tin; Case Code (Metric): 3216; Case Code (Imperial): 1206; Size Code: 1206; Min Operating Temperature: -55°C; Max Operating Temperature: 155°C; Tolerance: 1%; Resistor Type: Thick Film,Low-Ohm-Resistor; Temperature Coefficient: 100ppm/°C; Power Rating: 1W; Packaging: Tape and Reel; Package Quantity: 1; Number of Terminations: 2; Termination: SMD/SMT; Max Power Dissipation: 1W; Features: Automotive AEC-Q200; Series: ERJ; Technology: THICK FILM; Resistance Tolerance: 1%; Construction: Rectangular; Length: 3.2mm; Width: 0.063inch; Height: 0.65mm; Depth: 1.6mm; Radiation Hardening: No; REACH SVHC: No SVHC; Military Standard: Not; Lead Free: Lead Free; RoHS Compliant: Yes; ComponentLink1URL: https://datasheet.ciiva.com/11812/0900766b8126441d-11812516.pdf?src-supplier=RSComponents; ComponentLink1Description: https://datasheet.ciiva.com/11812/0900766b8126441d-11812516.pdf?src-supplier=RSComponents; ComponentLink2URL: https://datasheet.ciiva.com/16212/erj-8bwfr100v-16212037.pdf?src-supplier=Future+Electronics; ComponentLink2Description: https://datasheet.ciiva.com/16212/erj-8bwfr100v-16212037.pdf?src-supplier=Future+Electronics; ComponentLink3URL: https://datasheet.ciiva.com/24072/aoa0000ce3-72189-24072813.pdf?src-supplier=Mouser; ComponentLink3Description: https://datasheet.ciiva.com/24072/aoa0000ce3-72189-24072813.pdf?src-supplier=Mouser; ComponentLink4URL: https://datasheet.ciiva.com/2451/aoa0000ce3-2451533.pdf?src-supplier=Digi-Key; ComponentLink4Description: https://datasheet.ciiva.com/2451/aoa0000ce3-2451533.pdf?src-supplier=Digi-Key; ComponentLink5URL: https://datasheet.ciiva.com/17208/aoa0000ce3-17208060.pdf?src-supplier=Avnet+Europe; ComponentLink5Description: https://datasheet.ciiva.com/17208/aoa0000ce3-17208060.pdf?src-supplier=Avnet+Europe; ComponentLink6URL: https://datasheet.ciiva.com/2451/aoa0000ce3-2451532.pdf?src-supplier=Digi-Key; ComponentLink6Description: https://datasheet.ciiva.com/2451/aoa0000ce3-2451532.pdf?src-supplier=Digi-Key; ComponentLink7URL: https://datasheet.ciiva.com/46386/1662788-46386715.pdf?src-supplier=Element14; ComponentLink7Description: https://datasheet.ciiva.com/46386/1662788-46386715.pdf?src-supplier=Element14; ComponentLink8URL: https://datasheet.ciiva.com/6137/1662788-6137674.pdf?src-supplier=Farnell; ComponentLink8Description: https://datasheet.ciiva.com/6137/1662788-6137674.pdf?src-supplier=Farnell; ComponentLink9URL: https://datasheet.ciiva.com/43455/1662788-43455193.pdf?src-supplier=Farnell; ComponentLink9Description: https://datasheet.ciiva.com/43455/1662788-43455193.pdf?src-supplier=Farnell; ComponentLink10URL: https://datasheet.ciiva.com/16787/70068852-16787433.pdf?src-supplier=Allied+Electronics; ComponentLink10Description: https://datasheet.ciiva.com/16787/70068852-16787433.pdf?src-supplier=Allied+Electronics; ComponentLink11URL: https://datasheet.ciiva.com/28667/39793-28667735.pdf?src-supplier=Element14; ComponentLink11Description: https://datasheet.ciiva.com/28667/39793-28667735.pdf?src-supplier=Element14; ComponentLink12URL: https://datasheet.ciiva.com/48516/erj-eng-tds-48516677.pdf?src-supplier=Distrelec; ComponentLink12Description: https://datasheet.ciiva.com/48516/erj-eng-tds-48516677.pdf?src-supplier=Distrelec; ComponentLink13URL: https://datasheet.ciiva.com/30092/6aoa0000ce3-30092213.pdf?src-supplier=Onlinecomponents.com; ComponentLink13Description: https://datasheet.ciiva.com/30092/6aoa0000ce3-30092213.pdf?src-supplier=Onlinecomponents.com; ComponentLink14URL: https://datasheet.ciiva.com/16783/70068852-16783653.pdf?src-supplier=Allied+Electronics; ComponentLink14Description: https://datasheet.ciiva.com/16783/70068852-16783653.pdf?src-supplier=Allied+Electronics; ComponentLink15URL: https://datasheet.ciiva.com/16780/70068852-16780101.pdf?src-supplier=Allied+Electronics; ComponentLink15Description: https://datasheet.ciiva.com/16780/70068852-16780101.pdf?src-supplier=Allied+Electronics; ComponentLink16URL: https://datasheet.ciiva.com/2451/aoa0000ce3-2451534.pdf?src-supplier=Digi-Key; ComponentLink16Description: https://datasheet.ciiva.com/2451/aoa0000ce3-2451534.pdf?src-supplier=Digi-Key; ComponentLink17URL: https://datasheet.ciiva.com/16516/aoa0000ce3-16516495.pdf?src-supplier=Avnet+Asia; ComponentLink17Description: https://datasheet.ciiva.com/16516/aoa0000ce3-16516495.pdf?src-supplier=Avnet+Asia; Supplier Part Number 1: P.10AUCT-ND
footprint Res-1206
pins: 1, 2

## ERJ-3EKF4122V
designator R?, comment 41.2K
RES SMD 41.2K OHM 1% 1/10W 0603; Manufacturer: Panasonic; Manufacturer Part Number: ERJ-3EKF4122V; Resistance: 41.2kR; Temperature Coefficient: 100ppm/°C; Power Rating: 100mW; Voltage Rating: 75V; Voltage Rating (DC): 50V; Supplier 1: RSComponents; RoHS: Yes; Category: Chip SMD Resistors; Stock 1: 37024; Pricing 1: 1000=0.00500 (GBP); Mount: Surface Mount; Case/Package: 0603; Contact Plating: Tin; Case Code (Metric): 1608; Case Code (Imperial): 0603; Min Operating Temperature: -55°C; Max Operating Temperature: 155°C; Tolerance: 1%; Resistor Type: Thick Film; Packaging: Tape and Reel; Package Quantity: 1; Number of Terminations: 2; Termination: SMD/SMT; Max Power Dissipation: 100mW; Features: Automotive AEC-Q200; Length: 0.063inch; Width: 0.031inch; Height: 0.022inch; Radiation Hardening: No; REACH SVHC: Unknown; Lead Free: Lead Free; ComponentLink1URL: https://datasheet.ciiva.com/30231/aoa0000ce2-30231797.pdf?src-supplier=Onlinecomponents.com; ComponentLink1Description: https://datasheet.ciiva.com/30231/aoa0000ce2-30231797.pdf?src-supplier=Onlinecomponents.com; ComponentLink2URL: https://datasheet.ciiva.com/9117/aoa0000ce2-9117288.pdf?src-supplier=Avnet; ComponentLink2Description: https://datasheet.ciiva.com/9117/aoa0000ce2-9117288.pdf?src-supplier=Avnet; ComponentLink3URL: https://datasheet.ciiva.com/28672/1678782-28672360.pdf?src-supplier=Element14; ComponentLink3Description: https://datasheet.ciiva.com/28672/1678782-28672360.pdf?src-supplier=Element14; ComponentLink4URL: https://datasheet.ciiva.com/24025/aoa0000ce2-24025577.pdf?src-supplier=Mouser; ComponentLink4Description: https://datasheet.ciiva.com/24025/aoa0000ce2-24025577.pdf?src-supplier=Mouser; ComponentLink5URL: https://datasheet.ciiva.com/16788/70260748-16788157.pdf?src-supplier=Allied+Electronics; ComponentLink5Description: https://datasheet.ciiva.com/16788/70260748-16788157.pdf?src-supplier=Allied+Electronics; ComponentLink6URL: https://datasheet.ciiva.com/48531/aoa0000ce2-48531038.pdf?src-supplier=Avnet; ComponentLink6Description: https://datasheet.ciiva.com/48531/aoa0000ce2-48531038.pdf?src-supplier=Avnet; Supplier Part Number 1: 1763501
footprint Res0603
pins: 1, 2

## ERJP03F4702V
designator R?, comment 47K
RES SMD 47K Ohm 1% 0.2W(1/5W) 0603; Manufacturer: Panasonic; Manufacturer Part Number: ERJ-P03F4702V; Resistance: 47kR; Temperature Coefficient: 200ppm/°C; Power Rating: 200mW; Voltage Rating: 150V; Supplier 1: Digi-Key; RoHS: Yes; Category: Chip SMD Resistors; Stock 1: 5635; Pricing 1: 1=0.37000, 10=0.31600, 100=0.12360, 1000=0.05175, 2500=0.04744 (USD); Mount: Surface Mount; Case/Package: 0603; Number of Pins: 2; Contact Plating: Tin; Case Code (Imperial): 0603; Case Code (Metric): 1608; Min Operating Temperature: -55°C; Max Operating Temperature: 155°C; Tolerance: 1%; Resistor Type: Thick Film; Packaging: Tape and Reel; Package Quantity: 5000; Termination: SMD/SMT; Voltage Rating (DC): 150V; Length: 1.6mm; Width: 0.8mm; Height: 0.45mm; Depth: 0.8mm; Radiation Hardening: No; REACH SVHC: No SVHC; Military Standard: Not; RoHS Compliant: Yes; ComponentLink1URL: https://datasheet.ciiva.com/11817/0900766b812cb812-11817157.pdf?src-supplier=RSComponents; ComponentLink1Description: https://datasheet.ciiva.com/11817/0900766b812cb812-11817157.pdf?src-supplier=RSComponents; ComponentLink2URL: https://datasheet.ciiva.com/48537/erjp-series-eng-tds-48537294.pdf?src-supplier=Distrelec; ComponentLink2Description: https://datasheet.ciiva.com/48537/erjp-series-eng-tds-48537294.pdf?src-supplier=Distrelec; ComponentLink3URL: https://datasheet.ciiva.com/6138/1801181-6138332.pdf?src-supplier=Farnell; ComponentLink3Description: https://datasheet.ciiva.com/6138/1801181-6138332.pdf?src-supplier=Farnell; ComponentLink4URL: https://datasheet.ciiva.com/7802/1790600-7802523.pdf?src-supplier=Element14; ComponentLink4Description: https://datasheet.ciiva.com/7802/1790600-7802523.pdf?src-supplier=Element14; ComponentLink5URL: https://datasheet.ciiva.com/7802/1790600-7802522.pdf?src-supplier=Element14; ComponentLink5Description: https://datasheet.ciiva.com/7802/1790600-7802522.pdf?src-supplier=Element14; ComponentLink6URL: https://datasheet.ciiva.com/22730/1790600-22730106.pdf?src-supplier=Element14; ComponentLink6Description: https://datasheet.ciiva.com/22730/1790600-22730106.pdf?src-supplier=Element14; ComponentLink7URL: https://datasheet.ciiva.com/28681/1790600-28681575.pdf?src-supplier=Element14; ComponentLink7Description: https://datasheet.ciiva.com/28681/1790600-28681575.pdf?src-supplier=Element14; ComponentLink8URL: https://datasheet.ciiva.com/24072/aoa0000ce4-64075-24072175.pdf?src-supplier=Mouser; ComponentLink8Description: https://datasheet.ciiva.com/24072/aoa0000ce4-64075-24072175.pdf?src-supplier=Mouser; Supplier Part Number 1: P16027CT-ND
footprint Res0603
pins: 1, 2

## ERJU3RD3300V
designator R?, comment 330R
RES SMD 0.5% 100mW 33kΩ 0603; Manufacturer: PANASONIC; Temperature Coefficient: ±50ppm/℃; Tolerance: ±0.5%; Power(Watts): 100mW; Operating Temperature Range: -55℃~+155℃
footprint Res0603
footprint Res0603
pins: 1, 2

## FS8205A
designator Q?
2 N-Channel 466pF 10V 5.7nC 10V +150℃ (Tj) SOT23-6 MOSFETs; Manufacturer: TECH; Value: Custom; Manufacturer Part No: FS8205A; Package: SOT23-6; ComponentLink1Description: LCSC; ComponentLink1URL: https://lcsc.com/product-detail/MOSFETs_TECH-PUBLIC-FS8205A_C2830320.html
footprint SOT-23-6 (IC BAT CHG LI-ION 1 CELL SOT23-6)
part A pins: 1 S1, 2 D1/D2, 6 G1
part B pins: 3 S2, 4 G2, 5 D1/D2

## INA181A3IDBVR
designator U?
26V, bi-directional, 350kHz current sense amplifier 6-SOT-23 -40 to 125; Manufacturer: Texas Instruments; Number of Circuits: 1; Slew Rate: 2V/µs; Operating Supply Current: 260uA; FET Type: 2 N-Channel; Drain to Source Voltage (Vdss): 60V; Rds On Max: 2.1mR; Input Capacitance: 4.84nF; Max Power Dissipation: 12W; Supplier 1: Digi-Key; Manufacturer Part Number: INA181A3IDBVR; RoHS: Yes; Category: Amplifiers - Op Amps, Buffer, Instrumentation; Stock 1: 3258; Pricing 1: 1=0.51000, 10=0.43700, 25=0.40800, 100=0.32650, 250=0.30316, 500=0.25652, 1000=0.19822 (USD); Mount: Surface Mount; Case/Package: SOT-23-6; Number of Pins: 22; Min Operating Temperature: -40°C; Max Operating Temperature: 125°C; Packaging: Cut Tape; -3db Bandwidth: 350kHz; RoHS Compliant: Yes; ComponentLink1URL: http://www.ti.com/lit/ds/symlink/ina181.pdf?src-supplier=Digi-Key; ComponentLink1Description: http://www.ti.com/lit/ds/symlink/ina181.pdf?src-supplier=Digi-Key; Supplier Part Number 1: 296-47658-1-ND
footprint INA181A3IDBVR (IC CURR SENSE 1 CIRCUIT SOT23-6)
pins: 1 OUT, 2 GND, 3 IN+, 4 IN-, 5 REF, 6 VS

## IPB120P04P4L03ATMA2
designator Q?
MOSFET P-CH 40V 120A TO263-3; Manufacturer: Infineon; Manufacturer Part Number: IPB120P04P4L-03; Rise Time: 16ns; Rds On Max: 3.1mR; Max Dual Supply Voltage: -40V; Gate to Source Voltage (Vgs): 16V; Fall Time: 57ns; Turn-Off Delay Time: 85ns; Max Power Dissipation: 136W; Turn-On Delay Time: 21ns; Input Capacitance: 11.38nF; Element Configuration: Single; Supplier 1: Digi-Key; RoHS: Yes; Category: MOSFETs; Pricing 1: 1=3.19000, 10=2.86100, 100=2.34420, 500=2.00360 (USD); Case/Package: TO-263-3; Number of Pins: 3; Min Operating Temperature: -55°C; Max Operating Temperature: 175°C; Packaging: Tape and Reel; Drain to Source Voltage (Vdss): -40V; Continuous Drain Current (ID): 120A; Drain to Source Resistance: 3.1mR; Power Dissipation: 136W; Drain to Source Breakdown Voltage: -40V; Length: 10mm; Width: 9.25mm; Height: 4.4mm; Halogen Free: Halogen Free; RoHS Compliant: Yes; REACH SVHC: No SVHC; ComponentLink1URL: http://www.infineon.com/dgdl/Infineon-IPP_B_I120P04P4L_03-DS-v01_00-en.pdf?fileId=db3a30432f69f146012f783b3b5a2e3f&ack=t&src-supplier=Avnet; ComponentLink1Description: http://www.infineon.com/dgdl/Infineon-IPP_B_I120P04P4L_03-DS-v01_00-en.pdf?fileId=db3a30432f69f146012f783b3b5a2e3f&ack=t&src-supplier=Avnet; ComponentLink2URL: http://www.infineon.com/dgdl/Infineon-IPP_B_I120P04P4L_03-DS-v01_00-en.pdf?fileId=db3a30432f69f146012f783b3b5a2e3f&ack=t&src-supplier=Avnet+Europe; ComponentLink2Description: http://www.infineon.com/dgdl/Infineon-IPP_B_I120P04P4L_03-DS-v01_00-en.pdf?fileId=db3a30432f69f146012f783b3b5a2e3f&ack=t&src-supplier=Avnet+Europe; ComponentLink3URL: http://www.farnell.com/datasheets/2018448.pdf?src-supplier=Element14; ComponentLink3Description: http://www.farnell.com/datasheets/2018448.pdf?src-supplier=Element14; Supplier Part Number 1: 448-IPB120P04P4L03ATMA2DKR-ND
footprint IPB120P04P4L03ATMA2 (MOSFET P-CH 40V 120A TO263-3)
pins: 1 G, 2_4 D, 3 S

## LESD5Z5.0CT1G
designator D?
SOD-523 ESD Protection Devices ROHS; Manufacturer: UMW; Value: Custom; Manufacturer Part No: LESD5Z5.0CT1G; Package: SOD-523; ComponentLink1Description: LCSC; ComponentLink1URL: https://lcsc.com/product-detail/span-style-background-color-ff0-ESD-span-Protection-Devices_UMW-Youtai-Semiconductor-Co-Ltd-LESD5Z5-0CT1G_C2833276.html
footprint LESD5Z5.0CT1G
pins: 1 A, 2 A